# Altium footprint library STM32.PcbLib: 19 footprints (part 1 of 2)
Each footprint in its own frame and in the unit in brackets; x right, y up, seen from the top. Pads: shape width x height; smd on the part's side, far side on the other; paste and mask are expansions set on the pad; w line width, h text height; cw(c..) or ccw(c..) is an arc to the next point about the centre after c.
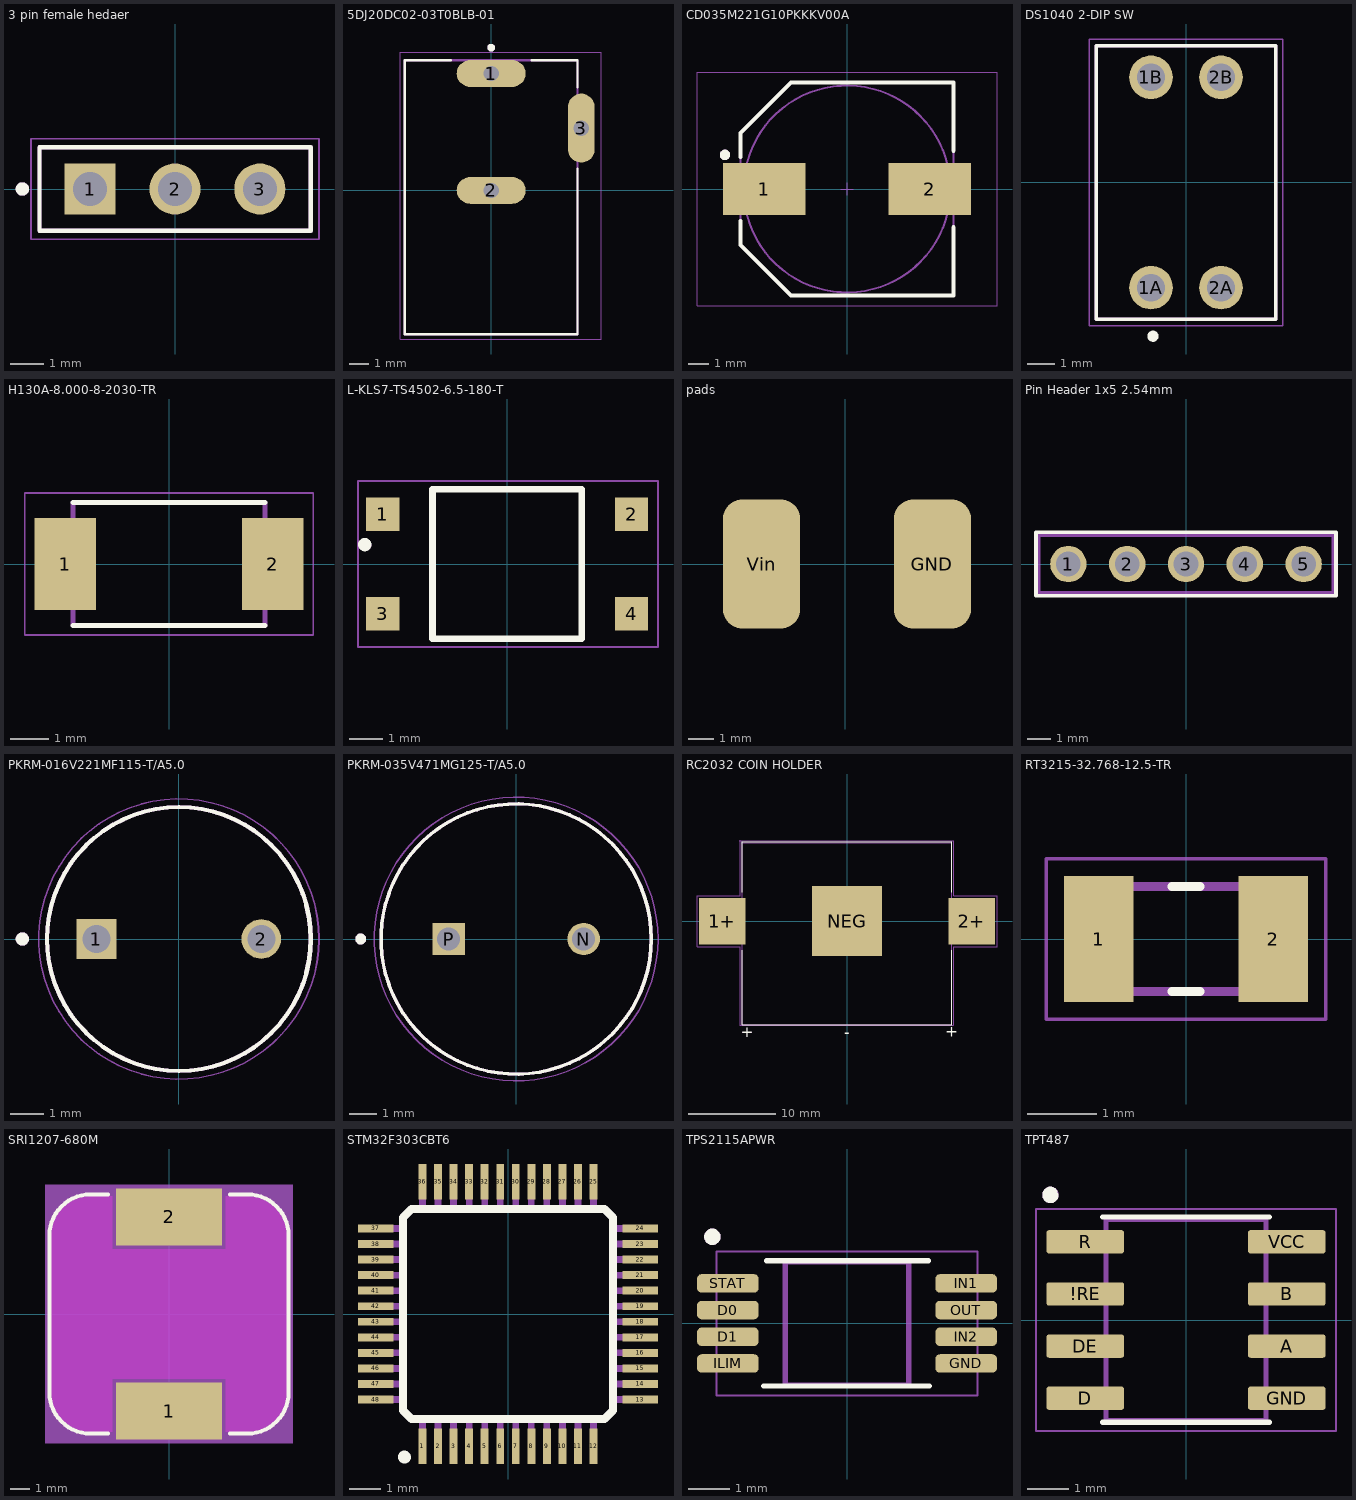
[diagram p0: the footprints below, top view; thin cyan lines are the x and y axes]

## 3 pin female hedaer [mm]
pads (3):
  rect 1.53x1.53 / inner round 1.53 / far side rect 1.53x1.53 hole 1.02 mask+0.102: 1(-2.54,0)
  round 1.53 hole 1.02 mask+0.102: 2(0,0) 3(2.54,0)
Top Overlay:
  circle w0.2: c-4.57,0 r0.1
  lines w0.127: -4.06,-1.25 4.06,-1.25 4.06,1.25 -4.06,1.25 -4.06,-1.25
Mechanical 13:
  circle w0.2: c-4.57,0 r0.1
  lines w0.127: -4.06,-1.25 4.06,-1.25 4.06,1.25 -4.06,1.25 -4.06,-1.25
Mechanical 15:
  lines w0.05: -4.31,-1.5 4.31,-1.5 4.31,1.5 -4.31,1.5 -4.31,-1.5
3D body "PPPC031LFBNRC--3DModel-STEP-269445.STEP": height 8.51, standoff -3.2, extent -4.064,-1.27 4.064,1.27

## 5DJ20DC02-03T0BLB-01 [mm] "DC JACK"
pads (3):
  oval 3.6x1.4 hole 0.8 square: 1(0,6.1) 2(0,0)
  oval 1.4x3.6 hole 0.8 square: 3(4.7,3.25)
Top Overlay:
  circle w0.2: c0,7.45 r0.1
  lines w0.127: -2.12,6.8 -4.5,6.8 -4.5,-7.5 4.5,-7.5 4.5,1.13 ; 2.12,6.8 4.5,6.8 4.5,5.37
Mechanical 13:
  circle w0.2: c0,7.45 r0.1
  lines w0.127: -4.5,-7.5 -4.5,6.8 4.5,6.8 4.5,-7.5 -4.5,-7.5
Mechanical 15:
  lines w0.05: -4.75,-7.75 5.75,-7.75 5.75,7.2 -4.75,7.2 -4.75,-7.75
3D body "step_temp.STEP": height 11, standoff -3.6, extent -4.5,-7.5 5,6.8

## CD035M221G10PKKKV00A [mm]
pads (2):
  rect 4x2.5 smd: 1(-4,0) 2(4,0)
Top Overlay:
  circle w0.25: c-5.9,1.65 r0.125
  lines w0.2: -5.15,-1.55 -5.15,-2.35 -5.15,-2.7 -2.7,-5.15 5.15,-5.15 5.15,-1.85 ; -5.15,1.55 -5.15,2.7 -2.7,5.15 5.15,5.15 5.15,1.85
Mechanical 14:
  circle w0.25: c-5.899,1.651 r0.125
  circle w0.1: c0,0 r5
  lines w0.1: -5.15,-2.7 -5.15,2.7 -2.7,5.15 5.15,5.15 5.15,-5.15 -2.7,-5.15 -5.15,-2.7
Mechanical 15:
  lines w0.05: -0.3,0 0.3,0 ; 0,-0.3 0,0.3 ; -7.25,-5.65 7.25,-5.65 7.25,5.65 -7.25,5.65 -7.25,-5.65
3D body "CAPAE1030X1020N.stp": height 10.2, standoff 0, extent -6,-5.25 6,5.25

## DS1040 2-DIP SW [mm]
pads (4):
  round 1.58 hole 1: 1A(-1.27,-3.81) 1B(-1.27,3.81) 2A(1.27,-3.81) 2B(1.27,3.81)
Top Overlay:
  circle w0.2: c-1.198,-5.573 r0.1
  circle w0.2: c-1.198,-5.573 r0.1
  lines w0.127: -3.25,-4.95 3.25,-4.95 3.25,4.95 -3.25,4.95 -3.25,-4.95
Mechanical 13:
  lines w0.127: -3.25,-4.95 3.25,-4.95 3.25,4.95 -3.25,4.95 -3.25,-4.95
Mechanical 15:
  lines w0.05: -3.5,-5.2 3.5,-5.2 3.5,5.2 -3.5,5.2 -3.5,-5.2
3D body "step_temp.STEP": height 6.57, standoff -3.78, extent -3.228,-4.95 3.272,4.95

## H130A-8.000-8-2030-TR [mm]
pads (2):
  rect 1.6x2.4 smd paste+0 mask+0.102: 1(-2.7,0) 2(2.7,0)
Top Overlay:
  lines w0.127: -2.5,-1.6 2.5,-1.6 ; -2.5,1.6 2.5,1.6
Mechanical 13:
  lines w0.127: -2.5,-1.6 -2.5,1.6 2.5,1.6 2.5,-1.6 -2.5,-1.6
Mechanical 15:
  lines w0.05: -3.75,-1.85 -3.75,1.85 3.75,1.85 3.75,-1.85 -3.75,-1.85
3D body "step_temp.STEP": height 1.4, standoff 0, extent -2.5,-1.6 2.5,1.6

## L-KLS7-TS4502-6.5-180-T [mm]
pads (4):
  rect 1x1 smd: 1(-3.75,1.5) 2(3.75,1.5) 3(-3.75,-1.5) 4(3.75,-1.5)
Top Overlay:
  circle w0.2: c-4.293,0.584 r0.1
  lines w0.2: -2.25,-2.25 2.25,-2.25 2.25,2.25 -2.25,2.25 -2.25,-2.25
Mechanical 13:
  lines w0.1: -2.25,-2.25 2.25,-2.25 2.25,2.25 -2.25,2.25 -2.25,-2.25
  lines w0.2: -4.229,0.507 ccw(c-4.293,0.584) -4.193,0.584
Mechanical 15:
  lines w0.05: -4.496,-2.5 -4.496,2.5 4.547,2.5 4.547,-2.5 -4.496,-2.5
3D body "SWT0211-050010GSA_revA.STEP": height 5, standoff -0.05, extent -3.429,-2.25 3.371,2.25

## pads [mil]
pads (2):
  rrect50% 120x200 smd paste-99999 mask+4: GND(135,0) Vin(-130,0)

## Pin Header 1x5 2.54mm [mil]
pads (5):
  round 62 hole 42 mask+4.02: 1(-200,0) 2(-100,0) 3(0,0) 4(100,0) 5(200,0)
Top Overlay:
  lines w6: -255,-54 -255,54 255,54 255,-54 -255,-54
Mechanical 13:
  lines w6: -250,-49 -250,49 250,49 250,-49 -250,-49
3D body "DS1021-1_5SF1-1.STEP": height 338.58, standoff -118.11, extent -247,-52 253,48

## PKRM-016V221MF115-T/A5.0 [mm]
pads (2):
  rect 1.2x1.2 / inner round 1.2 / far side rect 1.2x1.2 hole 0.85: 1(-2.5,0)
  round 1.2 hole 0.85: 2(2.5,0)
Top Overlay:
  circle w0.127: c0,0 r4
  circle w0.2: c-4.75,0 r0.1
Mechanical 13:
  circle w0.127: c0,0 r4
  circle w0.2: c-4.75,0 r0.1
Mechanical 15:
  circle w0.05: c0,0 r4.25
3D body "step_temp.STEP": height 12, standoff -19, extent -4,-4 4,4

## PKRM-035V471MG125-T/A5.0 [mm]
pads (2):
  round 1.2 hole 0.85: N(2.5,0)
  rect 1.2x1.2 hole 0.85: P(-2.5,0)
Top Overlay:
  circle w0.2: c-5.75,0 r0.1
  circle w0.127: c0,0 r5
Mechanical 13:
  circle w0.2: c-5.75,0 r0.1
  circle w0.127: c0,0 r5
Mechanical 15:
  circle w0.05: c0,0 r5.25
3D body "step_temp.STEP": height 12.5, standoff -17, extent -5,-4.998 5,4.998

## RC2032 COIN HOLDER [mm]
pads (3):
  rect 5.3x5.3 smd: 1+(-14.2,0) 2+(14.2,0)
  rect 8x8 smd paste-3: NEG(0,0)
Top Overlay:
  lines w0.127: -11.94,-3.3 -11.94,-11.811 11.94,-11.811 11.94,-3.3 ; -11.94,3.3 -11.94,9.068 11.94,9.068 11.94,3.3
  text "+" at -12.116,-13.233 h1.27
  text "+" at 11.176,-13.183 h1.27
  text "-" at -0.305,-13.284 h1.27
Mechanical 13:
  lines w0.127: -12.042,8.931 11.838,8.931 ; -11.965,-11.805 11.915,-11.805 ; -11.94,-11.811 -11.94,9.119 ; 11.94,-11.76 11.94,9.017
  text "-" at -0.305,-13.284 h1.27
  text "+" at -12.116,-13.233 h1.27
  text "+" at 11.176,-13.183 h1.27
Mechanical 15:
  lines w0.05: -12.292,9.181 12.088,9.181 ; -12.249,-11.904 12.131,-11.904 ; -12.19,-11.887 -12.19,-2.9 -17.1,-2.9 -17.1,2.9 -12.19,2.9 -12.19,9.195 ; 12.19,-11.862 12.19,-2.9 17.1,-2.9 17.1,2.9 12.19,2.9 12.19,9.144
3D body "BRX1-2032-SM--3DModel-STEP-231308.STEP": height 4.32, standoff 0, extent -16.7,-11.774 16.7,8.726

## RT3215-32.768-12.5-TR [mm]
pads (2):
  rect 1x1.8 smd: 1(-1.25,0) 2(1.25,0)
Top Overlay:
  lines w0.127: -0.2,-0.75 0.2,-0.75 ; -0.2,0.75 0.2,0.75
Mechanical 13:
  lines w0.127: -1.6,-0.75 1.6,-0.75 1.6,0.75 -1.6,0.75 -1.6,-0.75
Mechanical 15:
  lines w0.05: -2,-1.15 2,-1.15 2,1.15 -2,1.15 -2,-1.15
3D body "step_temp.STEP": height 0.9, standoff 0, extent -1.6,-0.75 1.6,0.75

## SRI1207-680M [mm]
pads (2):
  rect 5.4x2.9 smd: 1(0,-4.95) 2(0,4.95)
Top Overlay:
  lines w0.2: -3.1,-6.1 -4,-6.1 cw(c-4,-4) -6.1,-4 -6.1,4 ; -3.1,6.1 -4,6.1 ; 3.1,-6.1 4,-6.1 ccw(c4,-4) 6.1,-4 6.1,4 ccw(c4,4) 4,6.1 3.1,6.1 ; -6.1,4 cw(c-4,4) -4,6.1 ; -6.1,4 cw(c-4,4) -4,6.1
Keep-Out Layer:
  region: 4.105,5.997 4.209,5.989 4.313,5.975 4.416,5.956 4.518,5.932 4.618,5.902 4.717,5.867 4.813,5.827 4.908,5.782 5,5.732 5.089,5.677 5.176,5.618 5.259,5.554 5.338,5.486 5.414,5.414 5.486,5.338 5.554,5.259 5.618,5.176 5.677,5.089 5.732,5 5.782,4.908 5.827,4.813 5.867,4.717 5.902,4.618 5.932,4.518 5.956,4.416 5.975,4.313 5.989,4.209 5.997,4.105 6,4 6,-4 5.997,-4.105 5.989,-4.209 5.975,-4.313 5.956,-4.416 5.932,-4.518 5.902,-4.618 5.867,-4.717 5.827,-4.813 5.782,-4.908 5.732,-5 5.677,-5.089 5.618,-5.176 5.554,-5.259 5.486,-5.338 5.414,-5.414 5.338,-5.486 5.259,-5.554 5.176,-5.618 5.089,-5.677 5,-5.732 4.908,-5.782 4.813,-5.827 4.717,-5.867 4.618,-5.902 4.518,-5.932 4.416,-5.956 4.313,-5.975 4.209,-5.989 4.105,-5.997 4,-6 2.9,-6 2.9,-3.3 -2.9,-3.3 -2.9,-6 -4,-6 -4.105,-5.997 -4.209,-5.989 -4.313,-5.975 -4.416,-5.956 -4.518,-5.932 -4.618,-5.902 -4.717,-5.867 -4.813,-5.827 -4.908,-5.782 -5,-5.732 -5.089,-5.677 -5.176,-5.618 -5.259,-5.554 -5.338,-5.486 -5.414,-5.414 -5.486,-5.338 -5.554,-5.259 -5.618,-5.176 -5.677,-5.089 -5.732,-5 -5.782,-4.908 -5.827,-4.813 -5.867,-4.717 -5.902,-4.618 -5.932,-4.518 -5.956,-4.416 -5.975,-4.313 -5.989,-4.209 -5.997,-4.105 -6,-4 -6,4 -5.997,4.105 -5.989,4.209 -5.975,4.313 -5.956,4.416 -5.932,4.518 -5.902,4.618 -5.867,4.717 -5.827,4.813 -5.782,4.908 -5.732,5 -5.677,5.089 -5.618,5.176 -5.554,5.259 -5.486,5.338 -5.414,5.414 -5.338,5.486 -5.259,5.554 -5.176,5.618 -5.089,5.677 -5,5.732 -4.908,5.782 -4.813,5.827 -4.717,5.867 -4.618,5.902 -4.518,5.932 -4.416,5.956 -4.313,5.975 -4.209,5.989 -4.105,5.997 -4,6 -2.9,6 -2.9,3.3 2.9,3.3 2.9,6 4,6
Mechanical 13:
  circle w0.5: c-4.5,-4.5 r0.25
  lines w0.1: -6,-4 ccw(c-4,-4) -4,-6 4,-6 ccw(c4,-4) 6,-4 6,4 ccw(c4,4) 4,6 -4,6 ccw(c-4,4) -6,4 -6,-4
Mechanical 15:
  region: 6.3,-6.6 -6.3,-6.6 -6.3,6.6 6.3,6.6
3D body "step_temp.STEP": height 7.44, standoff -0.02, extent -6,-6 6,6

## STM32F303CBT6 [mm]
pads (48):
  rect 0.254x1.143 smd: 1(-2.75,-4.25) 2(-2.25,-4.25) 3(-1.75,-4.25) 4(-1.25,-4.25) 5(-0.75,-4.25) 6(-0.25,-4.25) 7(0.25,-4.25) 8(0.75,-4.25) 9(1.25,-4.25) 10(1.75,-4.25) 11(2.25,-4.25) 12(2.75,-4.25) 25(2.75,4.25) 26(2.25,4.25) 27(1.75,4.25) 28(1.25,4.25) 29(0.75,4.25) 30(0.25,4.25) 31(-0.25,4.25) 32(-0.75,4.25) 33(-1.25,4.25) 34(-1.75,4.25) 35(-2.25,4.25) 36(-2.75,4.25)
  rect 1.143x0.254 smd: 13(4.25,-2.75) 14(4.25,-2.25) 15(4.25,-1.75) 16(4.25,-1.25) 17(4.25,-0.75) 18(4.25,-0.25) 19(4.25,0.25) 20(4.25,0.75) 21(4.25,1.25) 22(4.25,1.75) 23(4.25,2.25) 24(4.25,2.75) 37(-4.25,2.75) 38(-4.25,2.25) 39(-4.25,1.75) 40(-4.25,1.25) 41(-4.25,0.75) 42(-4.25,0.25) 43(-4.25,-0.25) 44(-4.25,-0.75) 45(-4.25,-1.25) 46(-4.25,-1.75) 47(-4.25,-2.25) 48(-4.25,-2.75)
Top Overlay:
  circle w0.4: c-3.327,-4.597 r0.002
  lines w0.254: -3.375,-3.1 -3.375,3.1 -3.1,3.375 3.1,3.375 3.375,3.1 3.375,-3.1 3.1,-3.375 -3.1,-3.375 -3.375,-3.1
Mechanical 13:
  drawing of 48 lines, arcs and shapes, not listed
3D body "step_temp.STEP": height 1.56, standoff -0.04, extent -4.5,-4.5 4.5,4.5

## TPS2115APWR [mm]
pads (8):
  rrect50% 1.5x0.45 smd: D0(-2.9,0.325) D1(-2.9,-0.325) GND(2.9,-0.975) ILIM(-2.9,-0.975) IN1(2.9,0.975) IN2(2.9,-0.325) OUT(2.9,0.325) STAT(-2.9,0.975)
Top Overlay:
  circle w0.2: c-3.277,2.108 r0.1
  lines w0.127: -2.032,-1.524 2.007,-1.524 ; -1.956,1.524 1.981,1.524
Mechanical 13:
  circle w0.2: c-3.277,2.108 r0.1
  lines w0.127: -1.5,-1.5 1.5,-1.5 1.5,1.5 -1.5,1.5 -1.5,-1.5
Mechanical 15:
  lines w0.05: -3.18,-1.75 -3.18,1.75 3.18,1.75 3.18,-1.75 -3.18,-1.75
3D body "step_temp.STEP": height 1.1, standoff 0, extent -2.45,-1.5 2.45,1.5

## TPT487 [mm]
pads (8):
  rrect25% 1.9x0.57 smd: !RE(-2.455,0.635) A(2.455,-0.635) B(2.455,0.635) D(-2.455,-1.905) DE(-2.455,-0.635) GND(2.455,-1.905) R(-2.455,1.905) VCC(2.455,1.905)
Top Overlay:
  lines w0.127: -2.032,-2.489 2.032,-2.489 ; -2.032,2.51 2.032,2.51
  lines w0.2: -3.234,3.122 ccw(c-3.302,3.048) -3.202,3.048
Mechanical 13:
  circle w0.2: c-3.302,3.048 r0.1
  lines w0.127: -1.95,-2.45 -1.95,2.45 1.95,2.45 1.95,-2.45 -1.95,-2.45
Mechanical 15:
  lines w0.05: -3.655,-2.7 -3.655,2.7 3.655,2.7 3.655,-2.7 -3.655,-2.7
3D body "step_temp.STEP": height 1.75, standoff 0, extent -3,-2.45 3,2.45